# Altium footprint library SYNCBOX.PcbLib: 77 footprints (part 3 of 5)
Each footprint in its own frame and in the unit in brackets; x right, y up, seen from the top. Pads: shape width x height; smd on the part's side, far side on the other; paste and mask are expansions set on the pad; w line width, h text height; cw(c..) or ccw(c..) is an arc to the next point about the centre after c.
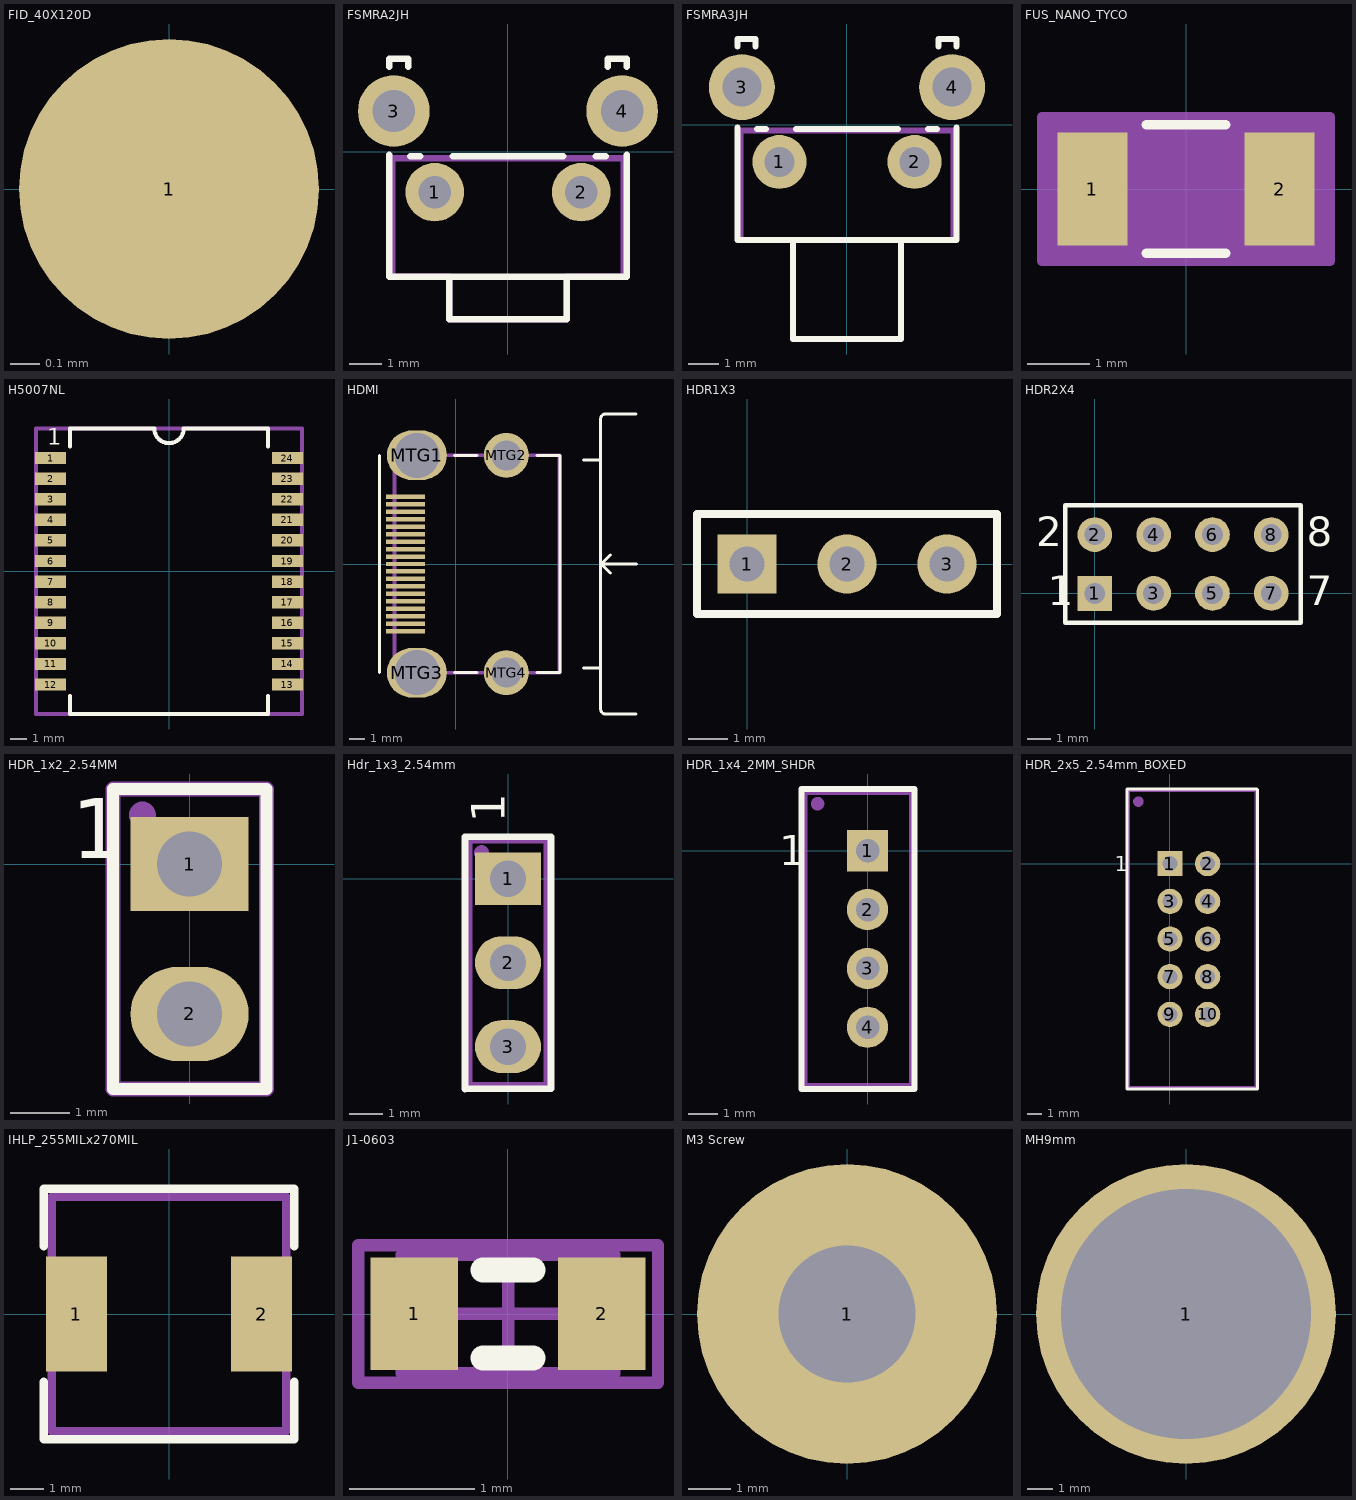
[diagram p2: the footprints below, top view; thin cyan lines are the x and y axes]

## FID_40X120D [mil]
pads (1):
  round 40 smd paste-40 mask+40: 1(0,0)

## FSMRA2JH [mm]
pads (4):
  round 1.8 hole 1: 1(-2.25,-1.245) 2(2.25,-1.245)
  round 2.2 hole 1.3: 3(-3.505,1.245) 4(3.505,1.245)
Top Overlay:
  lines w0.2: -3.65,-0.1 -3.65,-3.845 3.65,-3.845 3.65,-0.1 ; -3.65,2.6 -3.65,2.85 -3.055,2.85 -3.055,2.6 ; -3,-0.145 -2.7,-0.145 ; -1.8,-3.845 -1.8,-5.145 1.8,-5.145 1.8,-3.845 ; -1.7,-0.145 1.7,-0.145 ; 2.7,-0.145 3,-0.145 ; 3.055,2.6 3.055,2.85 3.65,2.85 3.65,2.6
Mechanical 16:
  lines w0.2: -3.55,-3.845 -1.8,-3.845 -1.8,-5.145 1.8,-5.145 1.8,-3.845 3.55,-3.845 3.55,-0.2 -3.55,-0.2 -3.55,-3.845
Mechanical 29:
  text ".Designator" at -1.5,-2.5 h1.2
3D body "c-1825027-5-g1-3d.stp": height 7.05, standoff -3.47, extent -4.204,-5.094 4.204,2.767

## FSMRA3JH [mm]
pads (4):
  round 1.8 hole 1: 1(-2.25,-1.245) 2(2.25,-1.245)
  round 2.2 hole 1.3: 3(-3.505,1.245) 4(3.505,1.245)
Top Overlay:
  lines w0.2: -3.65,-0.1 -3.65,-3.845 3.65,-3.845 3.65,-0.1 ; -3.65,2.6 -3.65,2.85 -3.055,2.85 -3.055,2.6 ; -3,-0.145 -2.7,-0.145 ; -1.8,-3.845 -1.8,-7.145 1.8,-7.145 1.8,-3.845 ; -1.7,-0.145 1.7,-0.145 ; 2.7,-0.145 3,-0.145 ; 3.055,2.6 3.055,2.85 3.65,2.85 3.65,2.6
Mechanical 16:
  lines w0.2: -3.55,-3.845 -1.8,-3.845 -1.8,-7.145 1.8,-7.145 1.8,-3.845 3.55,-3.845 3.55,-0.2 -3.55,-0.2 -3.55,-3.845
Mechanical 29:
  text ".Designator" at -1.5,-2.5 h1.2
3D body "c-1825027-8-g1-3d.stp": height 7.05, standoff -3.47, extent -4.204,-7.101 4.204,2.741

## FUS_NANO_TYCO [mil]
pads (2):
  rect 44x71 smd paste+0 mask+0: 1(-59,0) 2(59,0)
Top Overlay:
  lines w6: -24.89,-40.5 24.89,-40.5 ; -24.89,40.5 24.89,40.5
Mechanical 13:
  lines w1: -67,-35.5 -67,35.5 ; -67,-35.5 -37,-35.5 -37,35.5 -67,35.5 ; -67,-35.5 67,-35.5 ; -67,-35.5 -67,35.5 ; -67,35.5 67,35.5 ; 67,-35.5 37,-35.5 37,35.5 67,35.5 ; 67,-35.5 67,35.5 ; 67,-35.5 67,35.5
Mechanical 15:
  region: 91,-45.5 -91,-45.5 -91,45.5 91,45.5
  lines w6: -91,-45.5 -91,45.5 91,45.5 91,-45.5 -91,-45.5
3D body "FUS_NANO_TYCO.step": height 39.02, standoff 0, extent -67.01,-35.51 67.01,35.52
3D body: height 10, standoff 0, extent 0,0 10,10

## H5007NL [mil]
pads (24):
  rect 75x30 smd: 1(-287.5,275) 2(-287.5,225) 3(-287.5,175) 4(-287.5,125) 5(-287.5,75) 6(-287.5,25) 7(-287.5,-25) 8(-287.5,-75) 9(-287.5,-125) 10(-287.5,-175) 11(-287.5,-225) 12(-287.5,-275) 13(287.5,-275) 14(287.5,-225) 15(287.5,-175) 16(287.5,-125) 17(287.5,-75) 18(287.5,-25) 19(287.5,25) 20(287.5,75) 21(287.5,125) 22(287.5,175) 23(287.5,225) 24(287.5,275)
Top Overlay:
  lines w10: -240.16,-303.15 -240.16,-346.46 240.16,-346.46 240.16,-303.15 ; -240.16,303.15 -240.16,346.46 -37.66,346.46 ; -35.43,346.46 ccw(c0.01,346.46) 35.45,346.46 ; 37.66,346.46 240.16,346.46 240.16,303.15
  text "1" at -295.28,307.09 h40
Mechanical 16:
  circle w10: c-287.4,275.59 r3.94
  lines w10: -322.83,-346.46 -322.83,346.46 322.83,346.46 322.83,-346.46 -322.83,-346.46
Mechanical 29:
  text ".Designator" at -39.37,35.43 h60
3D body: height 216.93, standoff 0, extent -240.16,-346.46 240.16,346.46

## HDMI [mm]
pads (23):
  rect 2.6x0.3 smd mask+0.025: 1(-3.36,4.5) 2(-3.36,4) 3(-3.36,3.5) 4(-3.36,3) 5(-3.36,2.5) 6(-3.36,2) 7(-3.36,1.5) 8(-3.36,1) 9(-3.36,0.5) 10(-3.36,0) 11(-3.36,-0.5) 12(-3.36,-1) 13(-3.36,-1.5) 14(-3.36,-2) 15(-3.36,-2.5) 16(-3.36,-3) 17(-3.36,-3.5) 18(-3.36,-4) 19(-3.36,-4.5)
  oval 4x3.3 hole 3: MTG1(-2.6,7.25) MTG3(-2.6,-7.25)
  round 3 hole 2: MTG2(3.36,7.25) MTG4(3.36,-7.25)
Top Overlay:
  lines w0.2: -5.1,-7.25 -5.1,7.25 ; -0.1,-7.25 1.4,-7.25 ; -0.1,7.25 1.4,7.25 ; 5.4,-7.25 6.9,-7.25 6.95,-7.2 6.95,7.25 ; 5.4,7.25 6.9,7.25 ; 8.5,-6.95 9.65,-6.95 ; 8.5,6.95 9.65,6.95 ; 9.95,10 12,10 ; 10,10 ccw(c9.975,9.675) 9.65,9.7 9.65,-9.7 ccw(c9.975,-9.675) 10,-10 12,-10 ; 10.3,-0.6 9.7,0 ; 10.3,0.6 9.7,0 ; 12.05,0 9.7,0
Mechanical 1:
  text "NOTE: Holes are big and connector" at -6.5,12 h0.5
  text "doesnt fit on one place. Bottom" at -6.5,10.8 h0.5
  text "plastic may go over the board edge" at -6.6,9.6 h0.5
Mechanical 16:
  lines w0.254: -4.1,-7.25 -4.1,7.25 6.9,7.25 6.9,-7.25 -4.1,-7.25
Mechanical 29:
  text ".Designator" at 0.5,2.3 h1.52
3D body "471510001.stp": height 6.28, standoff -2.1, extent -4.2,-7.5 7.95,7.5

## HDR1X3 [mm]
pads (3):
  rect 1.5x1.5 hole 0.9: 1(0,0)
  round 1.5 hole 0.9: 2(2.54,0) 3(5.08,0)
Top Overlay:
  lines w0.2: -1.27,-1.27 6.35,-1.27 6.35,1.27 -1.27,1.27 -1.27,-1.27

## HDR2X4 [mm]
pads (8):
  rect 1.5x1.5 hole 0.9: 1(0,0)
  round 1.5 hole 0.9: 2(0,2.54) 3(2.54,0) 4(2.54,2.54) 5(5.08,0) 6(5.08,2.54) 7(7.62,0) 8(7.62,2.54)
Top Overlay:
  lines w0.2: -1.27,-1.27 8.89,-1.27 8.89,3.81 -1.27,3.81 -1.27,-1.27
  text "2" at -2.54,2.032 h1.27
  text "1" at -2.032,-0.508 h1.27
  text "7" at 9.144,-0.508 h1.27
  text "8" at 9.144,2.032 h1.27

## HDR_1x2_2.54MM [mm]
pads (2):
  rect 2x1.6 hole 1.1: 1(0,0)
  oval 2x1.6 hole 1.1: 2(0,-2.54)
Top Overlay:
  lines w0.2: -1.3,-3.81 -1.3,1.27 1.3,1.27 1.3,-3.81 -1.3,-3.81
  text "1" at -2,0.1 h1.02
Mechanical 16:
  circle w0.254: c-0.8,0.83 r0.1
  lines w0.254: -1.3,-3.81 1.3,-3.81 1.3,1.27 -1.3,1.27 -1.3,-3.81
Mechanical 29:
  text ".Designator" at 0.5,-2.7 h1
3D body "77311-118-02lf.stp": height 8.4, standoff -3.1, extent -1.205,-3.62 1.205,1.06

## Hdr_1x3_2.54mm [mm]
pads (3):
  rect 2x1.6 hole 1.1: 1(0,0)
  oval 2x1.6 hole 1.1: 2(0,-2.54) 3(0,-5.08)
Top Overlay:
  lines w0.2: -1.3,-6.36 -1.3,1.27 1.3,1.27 1.3,-6.3 ; -1.3,-6.35 1.3,-6.35
  text "1" at -0.1,1.7 h1.02
Mechanical 16:
  circle w0.254: c-0.8,0.79 r0.1
  lines w0.254: -1.2,-6.27 1.2,-6.27 1.2,1.19 -1.2,1.19 -1.2,-6.27
Mechanical 29:
  text ".Designator" at 0.8,-4.5 h1.52
3D body "77311-y18-03_asm.stp": height 8.4, standoff -3.1, extent -1.2,-6.15 1.21,1.07

## HDR_1x4_2MM_SHDR [mm]
pads (4):
  rect 1.4x1.4 hole 0.8: 1(0,0)
  round 1.4 hole 0.8: 2(0,-2) 3(0,-4) 4(0,-6)
Top Overlay:
  lines w0.2: -2.25,-8.1 -2.25,2.1 1.6,2.1 1.6,-8.1 -2.25,-8.1
  text "1" at -3,-0.5 h1.02
Mechanical 16:
  circle w0.254: c-1.7,1.6 r0.1
  lines w0.2: -2.15,-8 1.5,-8 1.5,2 -2.15,2 -2.15,-8
Mechanical 29:
  text ".Designator" at 0.5,-5.2 h1.52
3D body "532530470.stp": height 5.55, standoff -3.45, extent -2.15,-8 1.5,2

## HDR_2x5_2.54mm_BOXED [mm]
pads (10):
  rect 1.7x1.7 hole 1: 1(0,0)
  round 1.7 hole 1: 2(2.54,0) 3(0,-2.54) 4(2.54,-2.54) 5(0,-5.08) 6(2.54,-5.08) 7(0,-7.62) 8(2.54,-7.62) 9(0,-10.16) 10(2.54,-10.16)
Top Overlay:
  lines w0.2: -2.9,-15.19 -2.9,5.03 5.86,5.03 5.89,5 5.89,-15.19 -2.9,-15.19
  text "1" at -3.73,-0.53 h1.02
Mechanical 16:
  circle w0.5: c-2.13,4.18 r0.1
  lines w0.2: -2.8,-15.09 -2.8,4.93 5.79,4.93 5.79,-15.09 -2.8,-15.09
Mechanical 29:
  text ".Designator" at 2,-7 h1.52
3D body "30310-6002.stp": height 8.89, standoff -3.17, extent -2.906,-15.22 5.908,5.075

## IHLP_255MILx270MIL [mil]
pads (2):
  rect 72x135 smd: 1(-109,0) 2(109,0)
Top Overlay:
  lines w10: -147.64,-80 -147.64,-147.64 147.64,-147.64 147.64,-80 ; -147.64,80 -147.64,147.64 147.64,147.64 147.64,80
Mechanical 16:
  lines w10: -137.8,-137.8 137.8,-137.8 137.8,137.8 -137.8,137.8 -137.8,-137.8
Mechanical 29:
  text ".Designator" at -43.31,-27.56 h60
3D body: height 118.11, standoff 0, extent -95.72,-130 95.77,130.01
3D body: height 118.11, standoff 0, extent -119.44,-130.04 -72.19,-82.8
3D body: height 118.11, standoff 0, extent -119.3,82.95 -72.05,130.19
3D body: height 118.11, standoff 0, extent 72.15,82.95 119.39,130.19
3D body: height 118.11, standoff 0, extent 72.01,-130.04 119.25,-82.8
3D body: height 118.11, standoff 0, extent 95.63,-106.43 119.34,106.57
3D body: height 118.11, standoff 0, extent -119.25,-106.42 -95.53,106.57
3D body: height 78.74, standoff 0, extent -134.93,-62.92 -119.18,63.07
3D body: height 78.74, standoff 0, extent 119.34,-62.92 135.09,63.06

## J1-0603 [mm]
pads (2):
  rect 0.7x0.9 smd: 1(-0.75,0) 2(0.75,0)
Top Overlay:
  lines w0.2: -0.2,-0.35 0.2,-0.35 ; -0.2,0.35 0.2,0.35
Mechanical 13:
  lines w0.1: -0.85,-0.475 -0.85,0.475 0.85,0.475 0.85,-0.475 -0.85,-0.475
Mechanical 15:
  lines w0.1: -0.475,0 0.475,0 ; 0,-0.475 0,0.475 ; -1.2,-0.55 -1.2,0.55 1.2,0.55 1.2,-0.55 -1.2,-0.55
3D body: height 0.9, standoff 0, extent -0.85,-0.475 0.85,0.475

## M3 Screw [mm]
pads (1):
  round 7 hole 3.2: 1(0,0)

## MH9mm [mm]
pads (1):
  round 12 hole 10: 1(0,0)